# Altium footprint library 3032_battery_holder.PcbLib: 1 footprints
Each footprint in its own frame and in the unit in brackets; x right, y up, seen from the top. Pads: shape width x height; smd on the part's side, far side on the other; paste and mask are expansions set on the pad; w line width, h text height; cw(c..) or ccw(c..) is an arc to the next point about the centre after c.
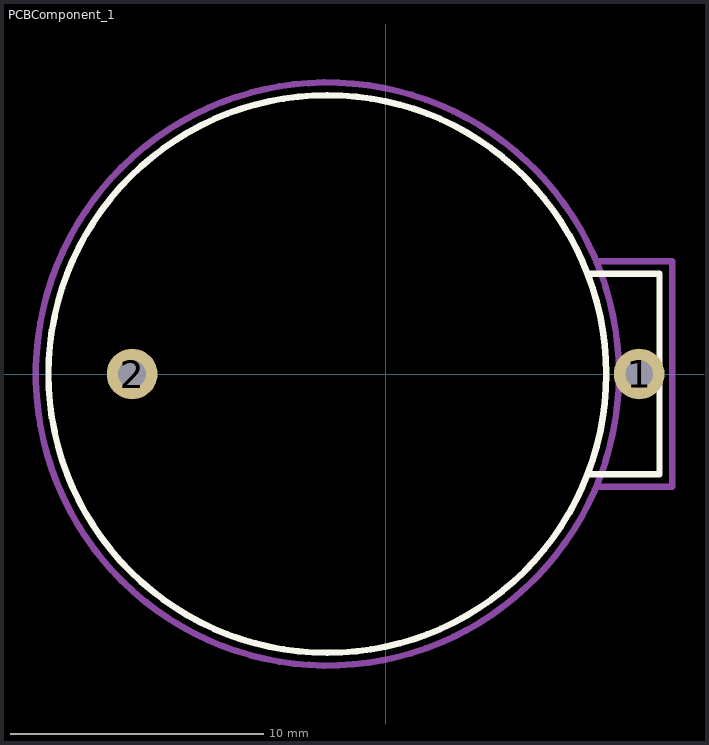
[diagram p0: the footprint, top view; thin cyan lines are the x and y axes]

## PCBComponent_1 [mm]
pads (2):
  round 2 hole 1.1: 1(10,0) 2(-10,0)
Top Overlay:
  circle w0.254: c-2.3,0 r11
  lines w0.254: 8,-3.95 10.8,-3.95 10.8,3.95 8,3.95
Mechanical 1:
  circle w0.254: c-2.3,0 r11.5
  lines w0.254: 8.3,-4.45 11.3,-4.45 11.3,4.45 8.3,4.45